# Altium footprint library 未分类IC.PcbLib: 46 footprints (part 2 of 3)
Each footprint in its own frame and in the unit in brackets; x right, y up, seen from the top. Pads: shape width x height; smd on the part's side, far side on the other; paste and mask are expansions set on the pad; w line width, h text height; cw(c..) or ccw(c..) is an arc to the next point about the centre after c.
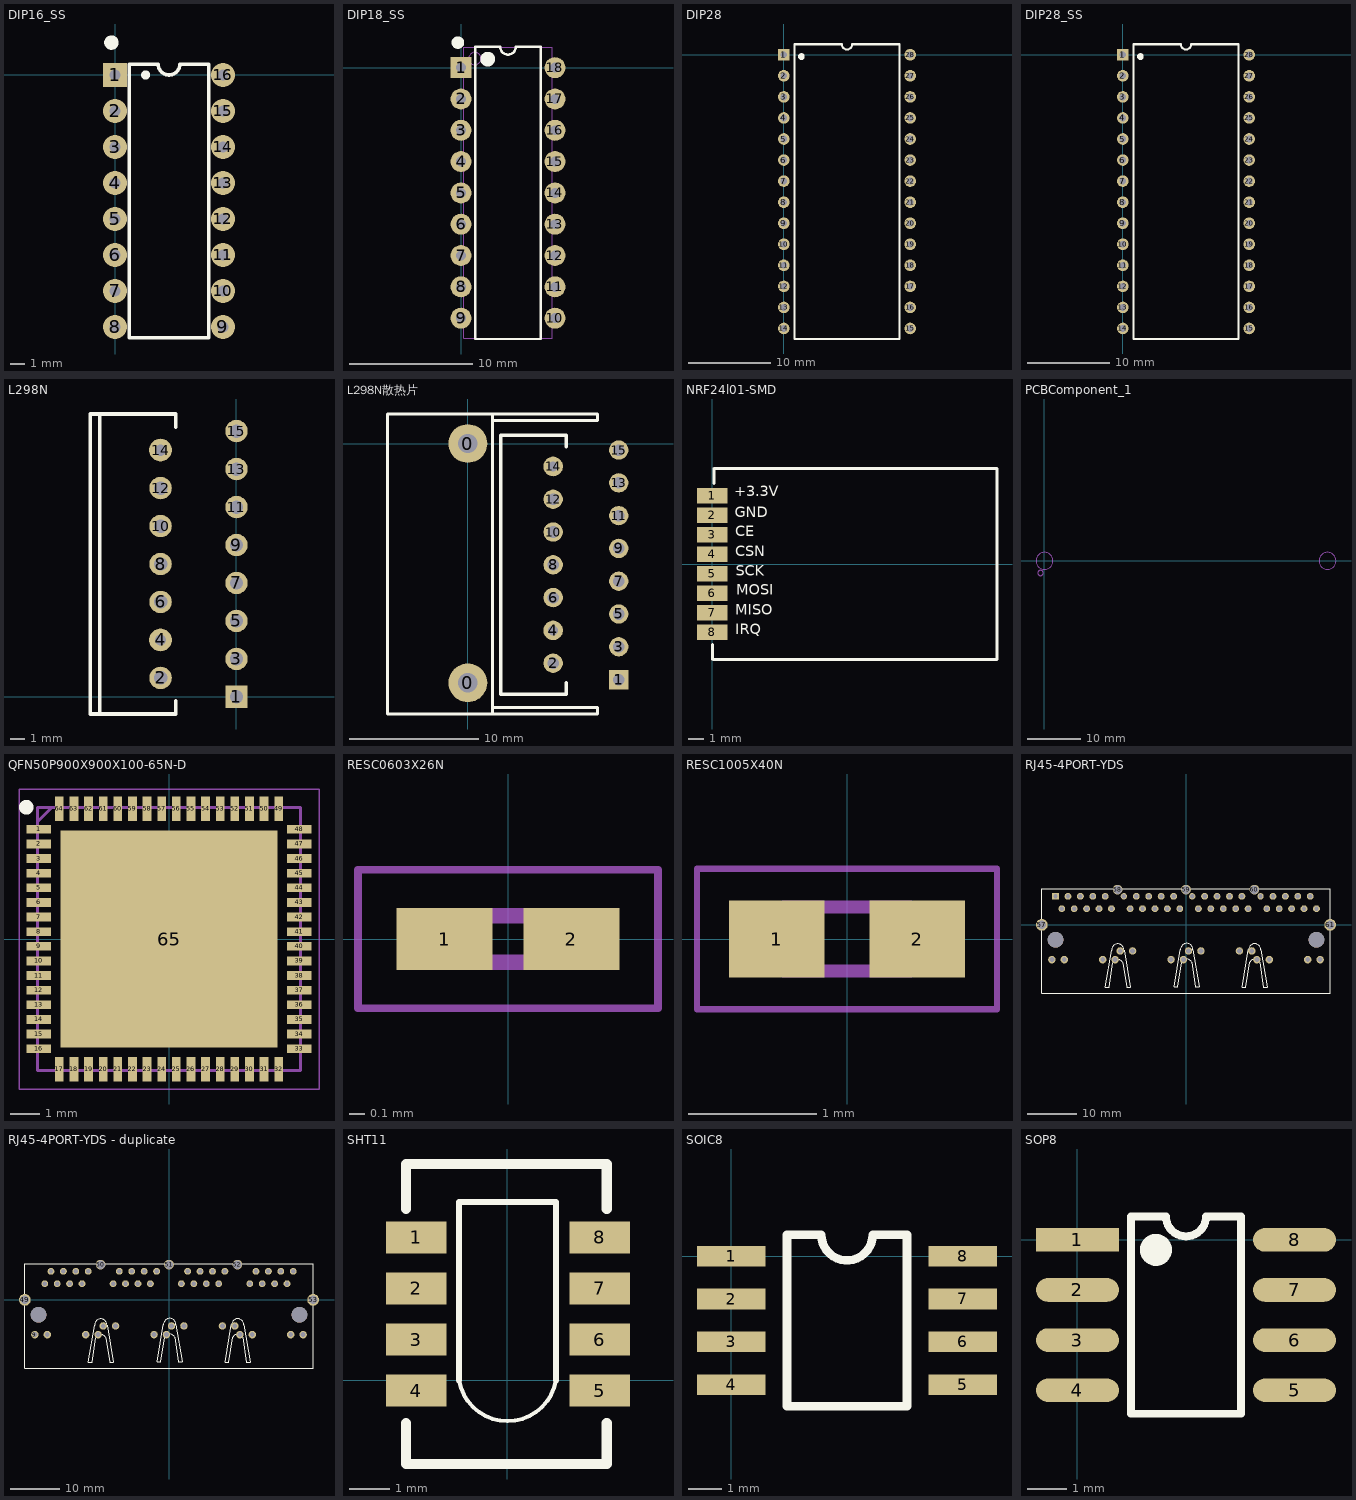
[diagram p1: the footprints below, top view; thin cyan lines are the x and y axes]

## DIP16_SS [mm] "DIP16-SMD Socket"
pads (16):
  rect 1.7x1.7 hole 0.8: 1(0,0)
  round 1.7 hole 0.8: 2(0,-2.54) 3(0,-5.08) 4(0,-7.62) 5(0,-10.16) 6(0,-12.7) 7(0,-15.24) 8(0,-17.78) 9(7.62,-17.78) 10(7.62,-15.24) 11(7.62,-12.7) 12(7.62,-10.16) 13(7.62,-7.62) 14(7.62,-5.08) 15(7.62,-2.54) 16(7.62,0)
Top Overlay:
  circle w0.381: c2.159,0 r0.127
  circle w0.508: c-0.254,2.286 r0.254
  lines w0.254: 1.016,-18.542 1.016,0.762 3.048,0.762 ccw(c3.81,0.762) 3.81,0 ccw(c3.81,0.762) 4.572,0.762 6.604,0.762 6.604,-18.542 1.016,-18.542
3D body "DIP-MH16-300.STEP": height 5.25, standoff -2.95, extent -1.171,-19.14 8.81,1.36
3D body "DIP16-300.STEP": height 7.5, standoff -0.1, extent -0.21,-18.54 7.83,0.76

## DIP18_SS [mm] "DIP18-SMD Socket"
height 5.08
pads (18):
  rect 1.7x1.7 hole 0.8: 1(0,0)
  round 1.7 hole 0.8: 2(0,-2.54) 3(0,-5.08) 4(0,-7.62) 5(0,-10.16) 6(0,-12.7) 7(0,-15.24) 8(0,-17.78) 9(0,-20.32) 10(7.62,-20.32) 11(7.62,-17.78) 12(7.62,-15.24) 13(7.62,-12.7) 14(7.62,-10.16) 15(7.62,-7.62) 16(7.62,-5.08) 17(7.62,-2.54) 18(7.62,0)
Top Overlay:
  circle w0.508: c-0.254,2.032 r0.254
  circle w0.6: c2.16,0.69 r0.3
  lines w0.2: 1.16,-22.01 1.16,1.69 3.175,1.69 ccw(c3.81,1.69) 4.445,1.69 6.46,1.69 6.46,-22.01 1.16,-22.01
Mechanical 13:
  circle w0.1: c1.11,0.74 r0.5
  lines w0.1: 0.21,-21.96 0.21,1.64 7.41,1.64 7.41,-21.96 0.21,-21.96
3D body "DIP18-300.STEP": height 7.4, standoff -0.04, extent -0.19,-21.71 7.81,1.39
3D body "DIP-MH18-300.STEP": height 5.25, standoff -2.95, extent -1.171,-21.68 8.81,1.36

## DIP28 [mm]
pads (28):
  rect 1.4x1.4 hole 0.813: 1(0,0)
  round 1.4 hole 0.813: 2(0,-2.54) 3(0,-5.08) 4(0,-7.62) 5(0,-10.16) 6(0,-12.7) 7(0,-15.24) 8(0,-17.78) 9(0,-20.32) 10(0,-22.86) 11(0,-25.4) 12(0,-27.94) 13(0,-30.48) 14(0,-33.02) 15(15.24,-33.02) 16(15.24,-30.48) 17(15.24,-27.94) 18(15.24,-25.4) 19(15.24,-22.86) 20(15.24,-20.32) 21(15.24,-17.78) 22(15.24,-15.24) 23(15.24,-12.7) 24(15.24,-10.16) 25(15.24,-7.62) 26(15.24,-5.08) 27(15.24,-2.54) 28(15.24,0)
Top Overlay:
  circle w0.5: c2.12,-0.21 r0.15
  lines w0.254: 1.27,-34.29 13.97,-34.29 13.97,1.27 8.255,1.27 cw(c7.62,1.27) 6.985,1.27 1.27,1.27 1.27,-34.29
3D body "DIP28.STEP": height 4.66, standoff -3.28, extent -0.126,-34.486 15.494,1.524

## DIP28_SS [mm] "DIP28-SMD Socket"
pads (28):
  rect 1.4x1.4 hole 0.813: 1(0,0)
  round 1.4 hole 0.813: 2(0,-2.54) 3(0,-5.08) 4(0,-7.62) 5(0,-10.16) 6(0,-12.7) 7(0,-15.24) 8(0,-17.78) 9(0,-20.32) 10(0,-22.86) 11(0,-25.4) 12(0,-27.94) 13(0,-30.48) 14(0,-33.02) 15(15.24,-33.02) 16(15.24,-30.48) 17(15.24,-27.94) 18(15.24,-25.4) 19(15.24,-22.86) 20(15.24,-20.32) 21(15.24,-17.78) 22(15.24,-15.24) 23(15.24,-12.7) 24(15.24,-10.16) 25(15.24,-7.62) 26(15.24,-5.08) 27(15.24,-2.54) 28(15.24,0)
Top Overlay:
  circle w0.5: c2.12,-0.21 r0.15
  lines w0.254: 1.27,-34.29 13.97,-34.29 13.97,1.27 8.255,1.27 cw(c7.62,1.27) 6.985,1.27 1.27,1.27 1.27,-34.29
3D body "DIP28-座.STEP": height 5.1, standoff -3.1, extent -1.27,-34.29 16.51,1.27
3D body "DIP28.STEP": height 7.66, standoff -0.28, extent -0.063,-34.613 15.557,1.397

## L298N [mm]
pads (15):
  rect 1.5x1.5 hole 0.9: 1(0,0)
  round 1.5 hole 0.9: 2(-5.08,1.27) 3(0,2.54) 5(0,5.08) 6(-5.08,6.35) 7(0,7.62) 8(-5.08,8.89) 9(0,10.16) 10(-5.08,11.43) 11(0,12.7) 12(-5.08,13.97) 13(0,15.24) 15(0,17.78)
  round 1.524 hole 0.762: 4(-5.08,3.81) 14(-5.08,16.51)
Top Overlay:
  lines w0.254: -9.017,18.923 -9.779,18.923 -9.779,-0.508 -9.779,-1.143 -9.144,-1.143 ; -4.064,-0.254 -4.064,-1.143 -6.731,-1.143 -9.144,-1.143 ; -4.064,18.034 -4.064,18.923 -6.731,18.923 -9.144,18.923 -9.144,-1.143
3D body "User Library-Multiwatt15V.STEP": height 20.8, standoff -1.5, extent -9.652,-0.889 0.238,18.711

## L298N散热片 [mm]
pads (17):
  round 3 hole 1.5: 0(0,-18.542) 0(0,0)
  rect 1.5x1.5 hole 0.9: 1(11.684,-18.288)
  round 1.5 hole 0.9: 2(6.604,-17.018) 3(11.684,-15.748) 5(11.684,-13.208) 6(6.604,-11.938) 7(11.684,-10.668) 8(6.604,-9.398) 9(11.684,-8.128) 10(6.604,-6.858) 11(11.684,-5.588) 12(6.604,-4.318) 13(11.684,-3.048) 15(11.684,-0.508)
  round 1.524 hole 0.762: 4(6.604,-14.478) 14(6.604,-1.778)
Top Overlay:
  lines w0.254: 1.905,-20.447 10.033,-20.447 10.033,-20.955 1.905,-20.955 ; 1.905,1.778 10.033,1.778 10.033,2.286 9.779,2.286 1.905,2.286 ; 7.62,-18.542 7.62,-19.431 4.953,-19.431 2.54,-19.431 2.54,0.635 4.953,0.635 7.62,0.635 7.62,-0.254 ; 1.905,-20.955 -6.223,-20.955 -6.223,2.286 1.905,2.286 ; 1.905,-20.955 1.905,-19.812 1.905,-18.796 1.905,2.286
3D body "User Library-Multiwatt15V.STEP": height 20.8, standoff -1.5, extent 2.032,-19.177 11.922,0.423
3D body "User Library-radiator_l298.STEP": height 25, standoff -4, extent -6.602,-21.209 9.398,2.791

## NRF24l01-SMD [mm]
height 0.051
pads (8):
  rect 2x1 smd: 1(0,4.445) 2(0,3.175) 3(0,1.905) 4(0,0.635) 5(0,-0.635) 6(0,-1.905) 7(0,-3.175) 8(0,-4.445)
Top Overlay:
  lines w0.2: 0,-5.255 0,-6.191 0.032,-6.223 18.542,-6.223 18.542,6.223 0.122,6.223 0.1,6.201 0.1,5.245
  text "IRQ" at 1.499,-4.826 h1.2
  text "MISO" at 1.499,-3.581 h1.2
  text "MOSI" at 1.549,-2.261 h1.2
  text "SCK" at 1.524,-1.016 h1.2
  text "CSN" at 1.499,0.254 h1.2
  text "CE" at 1.499,1.549 h1.2
  text "GND" at 1.448,2.794 h1.2
  text "+3.3V" at 1.422,4.14 h1.2
3D body: height 2, standoff 0.1, extent 3.81,-5.08 8.89,-3.175
3D body: height 1.3, standoff 0.1, extent 1.905,-5.334 3.175,-4.445
3D body: height 1.3, standoff 0.1, extent 1.905,-3.81 3.175,-2.794
3D body: height 1.3, standoff 0.1, extent 16.764,-1.651 17.78,0.381
3D body: height 1.3, standoff 0.1, extent 9.652,-3.683 10.668,-0.635
3D body: height 1.3, standoff 0.1, extent 16.764,-5.207 17.78,-3.683
3D body: height 1.3, standoff 0.1, extent 11.684,-3.683 17.78,-2.667
3D body: height 1.3, standoff 0.1, extent 11.684,-2.667 12.7,-1.651
3D body: height 1.3, standoff 0.1, extent 11.684,-1.651 17.78,-0.635
3D body: height 1.3, standoff 0.1, extent 11.684,0.381 17.78,1.397
3D body: height 1.3, standoff 0.1, extent 11.684,0.889 12.7,2.413
3D body: height 1.3, standoff 0.1, extent 11.684,2.413 17.78,3.429
3D body: height 1.3, standoff 0.1, extent 16.764,2.921 17.78,4.445
3D body: height 1.3, standoff 0.1, extent 9.652,4.445 17.78,5.461
3D body: height 1.3, standoff 0, extent 9.652,-0.635 10.668,4.953
3D body: height 1.8, standoff 0.1, extent 2.032,-0.635 8.008,5.353
3D body: height 1.2, standoff 0, extent 1.016,-5.715 18.288,5.969

## PCBComponent_1 [mm]
Mechanical 1:
  circle w0.152: c-0.75,-2.28 r0.5
  circle w0.2: c53.34,0 r1.6
  circle w0.2: c0,0 r1.6

## QFN50P900X900X100-65N-D [mm]
pads (65):
  rect 0.85x0.3 smd: 1(-4.45,3.75) 2(-4.45,3.25) 3(-4.45,2.75) 4(-4.45,2.25) 5(-4.45,1.75) 6(-4.45,1.25) 7(-4.45,0.75) 8(-4.45,0.25) 9(-4.45,-0.25) 10(-4.45,-0.75) 11(-4.45,-1.25) 12(-4.45,-1.75) 13(-4.45,-2.25) 14(-4.45,-2.75) 15(-4.45,-3.25) 16(-4.45,-3.75) 33(4.45,-3.75) 34(4.45,-3.25) 35(4.45,-2.75) 36(4.45,-2.25) 37(4.45,-1.75) 38(4.45,-1.25) 39(4.45,-0.75) 40(4.45,-0.25) 41(4.45,0.25) 42(4.45,0.75) 43(4.45,1.25) 44(4.45,1.75) 45(4.45,2.25) 46(4.45,2.75) 47(4.45,3.25) 48(4.45,3.75)
  rect 0.3x0.85 smd: 17(-3.75,-4.45) 18(-3.25,-4.45) 19(-2.75,-4.45) 20(-2.25,-4.45) 21(-1.75,-4.45) 22(-1.25,-4.45) 23(-0.75,-4.45) 24(-0.25,-4.45) 25(0.25,-4.45) 26(0.75,-4.45) 27(1.25,-4.45) 28(1.75,-4.45) 29(2.25,-4.45) 30(2.75,-4.45) 31(3.25,-4.45) 32(3.75,-4.45) 49(3.75,4.45) 50(3.25,4.45) 51(2.75,4.45) 52(2.25,4.45) 53(1.75,4.45) 54(1.25,4.45) 55(0.75,4.45) 56(0.25,4.45) 57(-0.25,4.45) 58(-0.75,4.45) 59(-1.25,4.45) 60(-1.75,4.45) 61(-2.25,4.45) 62(-2.75,4.45) 63(-3.25,4.45) 64(-3.75,4.45)
  rect 7.4x7.4 smd: 65(0,0)
Top Overlay:
  circle w0.25: c-4.875,4.5 r0.125
Mechanical 13:
  lines w0.1: -4.5,4 -4,4.5 ; -4.5,-4.5 -4.5,4.5 4.5,4.5 4.5,-4.5 -4.5,-4.5
Mechanical 15:
  lines w0.05: -5.125,-5.125 -5.125,5.125 5.125,5.125 5.125,-5.125 -5.125,-5.125
3D body "LAN9514-JZX.stp": height 1, standoff 0, extent -4.55,-4.55 4.55,4.55

## RESC0603X26N [mm]
pads (2):
  rect 0.625x0.4 smd: 1(-0.412,0) 2(0.412,0)
Mechanical 13:
  lines w0.1: -0.3,-0.15 -0.3,0.15 0.3,0.15 0.3,-0.15 -0.3,-0.15
Mechanical 15:
  lines w0.05: -0.975,-0.45 -0.975,0.45 0.975,0.45 0.975,-0.45 -0.975,-0.45
3D body "ERJ1GNF2403C.stp": height 0.26, standoff 0, extent -0.3,-0.15 0.3,0.15

## RESC1005X40N [mm]
pads (2):
  rect 0.75x0.6 smd: 1(-0.55,0) 2(0.55,0)
Mechanical 13:
  lines w0.1: -0.5,-0.25 0.5,-0.25 0.5,0.25 -0.5,0.25 -0.5,-0.25
Mechanical 15:
  lines w0.05: -1.175,-0.55 1.175,-0.55 1.175,0.55 -1.175,0.55 -1.175,-0.55
3D body "ERJ2RKF1001X.stp": height 0.4, standoff 0, extent -0.5,-0.25 0.5,0.25

## RJ45-4PORT-YDS [mm] "-21.5X59.12-H13.6"
pads (63):
  rect 1.4x1.4 hole 0.9: 1(-26.67,5.795)
  round 1.4 hole 0.9: 2(-25.4,3.255) 3(-24.13,5.795) 4(-22.86,3.255) 5(-21.59,5.795) 6(-20.32,3.255) 7(-19.05,5.795) 8(-17.78,3.255) 9(-16.51,5.795) 10(-15.24,3.255) 16(-11.43,3.255) 17(-10.16,5.795) 18(-8.89,3.255) 19(-7.62,5.795) 20(-6.35,3.255) 21(-5.08,5.795) 22(-3.81,3.255) 23(-2.54,5.795) 24(-1.27,3.255) 30(2.54,3.255) 31(3.81,5.795) 32(5.08,3.255) 33(6.35,5.795) 34(7.62,3.255) 35(8.89,5.795) 36(10.16,3.255) 37(11.43,5.795) 38(12.7,3.255) 44(16.51,3.255) 45(17.78,5.795) 46(19.05,3.255) 47(20.32,5.795) 48(21.59,3.255) 49(22.86,5.795) 50(24.13,3.255) 51(25.4,5.795) 52(26.67,3.255)
  round 1.524 hole 1: 11(-27.42,-7.155) 12(-24.88,-7.155) 13(-17.03,-7.155) 14(-14.49,-7.155) 25(-13.45,-5.375) 26(-10.91,-5.375) 27(-3.06,-7.155) 28(-0.52,-7.155) 39(0.52,-5.375) 40(3.06,-5.375) 41(10.91,-5.375) 42(13.45,-5.375) 53(14.49,-7.155) 54(17.03,-7.155) 55(24.88,-7.155) 56(27.42,-7.155)
  round 1.3 hole 0.9: 15(-12.7,5.795) 29(1.27,5.795) 43(15.24,5.795)
  round 2.4 hole 1.7: 57(-29.465,-0.045) 61(29.465,-0.045)
  round 2 hole 1.7: 58(-13.97,7.155) 59(0,7.155) 60(13.97,7.155)
  round 3.2 hole 3.2 unplated: ""(-26.67,-3.095) ""(26.67,-3.095)
Top Overlay:
  lines w0.254: -1.27,7.322 29.464,7.322 29.464,-14.014 -29.464,-14.014 -29.464,7.322 0,7.322 ; -16.474,-12.818 -15.204,-5.198 cw(c-13.935,-5.198) -12.665,-5.198 -11.394,-12.818 -12.157,-12.818 -12.918,-7.738 ccw(c-13.935,-8.246) -14.951,-7.738 -15.712,-12.818 -16.475,-12.818 ; -2.411,-12.724 -1.141,-5.104 cw(c0.129,-5.104) 1.399,-5.104 2.669,-12.724 1.907,-12.724 1.145,-7.644 ccw(c0.129,-8.152) -0.887,-7.644 -1.649,-12.724 -2.411,-12.724 ; 11.493,-12.79 12.763,-5.17 cw(c14.033,-5.17) 15.303,-5.17 16.573,-12.79 15.811,-12.79 15.049,-7.71 ccw(c14.033,-8.218) 13.017,-7.71 12.255,-12.79 11.493,-12.79
3D body "User Library-Connector KINSUN 8P8C 3047414102 3047S 4PORT RJ45 WLED.STEP": height 14.49, standoff -2.74, extent -27.513,-8.128 27.767,7.082

## RJ45-4PORT-YDS - duplicate [mm] "-21.5X59.12-H13.6"
pads (55):
  round 1.4 hole 0.9: 1(-25.4,3.255) 2(-24.13,5.795) 3(-22.86,3.255) 4(-21.59,5.795) 5(-20.32,3.255) 6(-19.05,5.795) 7(-17.78,3.255) 8(-16.51,5.795) 13(-11.43,3.255) 14(-10.16,5.795) 15(-8.89,3.255) 16(-7.62,5.795) 17(-6.35,3.255) 18(-5.08,5.795) 19(-3.81,3.255) 20(-2.54,5.795) 25(2.54,3.255) 26(3.81,5.795) 27(5.08,3.255) 28(6.35,5.795) 29(7.62,3.255) 30(8.89,5.795) 31(10.16,3.255) 32(11.43,5.795) 37(16.51,3.255) 38(17.78,5.795) 39(19.05,3.255) 40(20.32,5.795) 41(21.59,3.255) 42(22.86,5.795) 43(24.13,3.255) 44(25.4,5.795)
  round 1.524 hole 1: 9(-27.42,-7.155) 10(-24.88,-7.155) 11(-17.03,-7.155) 12(-14.49,-7.155) 21(-13.45,-5.375) 22(-10.91,-5.375) 23(-3.06,-7.155) 24(-0.52,-7.155) 33(0.52,-5.375) 34(3.06,-5.375) 35(10.91,-5.375) 36(13.45,-5.375) 45(14.49,-7.155) 46(17.03,-7.155) 47(24.88,-7.155) 48(27.42,-7.155)
  round 2.4 hole 1.7: 49(-29.465,-0.045) 53(29.465,-0.045)
  round 2 hole 1.7: 50(-13.97,7.155) 51(0,7.155) 52(13.97,7.155)
  round 3.2 hole 3.2 unplated: ""(-26.67,-3.095) ""(26.67,-3.095)
Top Overlay:
  lines w0.254: -1.27,7.322 29.464,7.322 29.464,-14.014 -29.464,-14.014 -29.464,7.322 0,7.322 ; -16.475,-12.818 -15.713,-12.818 -14.951,-7.738 cw(c-13.935,-8.246) -12.919,-7.738 -12.156,-12.818 -11.395,-12.818 -12.664,-5.198 ccw(c-13.935,-5.198) -15.205,-5.198 -16.474,-12.818 ; -2.411,-12.724 -1.649,-12.724 -0.887,-7.644 cw(c0.129,-8.152) 1.145,-7.644 1.907,-12.724 2.669,-12.724 1.399,-5.104 ccw(c0.129,-5.104) -1.141,-5.104 -2.411,-12.724 ; 11.493,-12.79 12.255,-12.79 13.017,-7.71 cw(c14.033,-8.218) 15.049,-7.71 15.811,-12.79 16.573,-12.79 15.303,-5.17 ccw(c14.033,-5.17) 12.763,-5.17 11.493,-12.79

## SHT11 [mm]
pads (8):
  rect 1.5x0.8 smd: 1(-2.273,3.556) 2(-2.273,2.286) 3(-2.273,1.016) 4(-2.273,-0.254) 5(2.299,-0.254) 6(2.299,1.016) 7(2.299,2.286) 8(2.299,3.556)
Top Overlay:
  lines w0.1: -1.207,0 ccw(c0,0.206) 1.207,0
  lines w0.15: -1.206,0 -1.206,4.445 1.206,4.445 1.206,0
  lines w0.254: -2.527,-1.068 -2.527,-2.084 2.473,-2.084 2.473,-1.063 ; -2.527,4.266 -2.527,5.386 2.473,5.386 2.473,4.271
3D body "SHT11.STEP": height 2.35, standoff -0.01, extent -2.452,-2.061 2.478,5.409

## SOIC8 [mil]
pads (8):
  rect 80x24 smd: 1(0,0) 2(0,-50.06) 3(0,-100.06) 4(0,-150.06) 5(270,-150) 6(270,-100) 7(270,-50) 8(270,0)
Top Overlay:
  lines w10: 75,24.94 75.06,25 105,25 ccw(c135,25) 165,25 204.94,25 205,24.94 205,-175.06 65,-175.06 65,24.94 95,24.94
3D body "SOIC-8.STEP": height 68.7, standoff -0.31, extent 12.97,-173.85 257.03,23

## SOP8 [mm]
height 1.75
pads (8):
  rect 2.1x0.6 smd: 1(0,0)
  oval 2.1x0.6 smd: 2(0,-1.27) 3(0,-2.54) 4(0,-3.81) 5(5.5,-3.81) 6(5.5,-2.54) 7(5.5,-1.27) 8(5.5,0)
Top Overlay:
  circle w0.5: c1.988,-0.254 r0.155
  lines w0.2: 1.353,0.595 1.353,-4.405 4.147,-4.405 4.147,0.595
  lines w0.203: 1.353,0.595 2.242,0.595 ccw(c2.75,0.595) 2.75,0.087 ccw(c2.75,0.595) 3.258,0.595 4.147,0.595
3D body "SOP8.STEP": height 1.9, standoff 0, extent -0.361,-4.369 5.644,0.631